# Altium schematic symbol library DS04-254-2-03BK-SMT.SchLib: 1 symbol
Pins are listed as number, name and electrical type; pins without a type are passive.

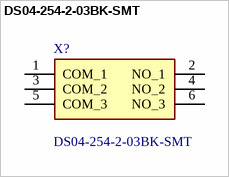
[diagram p0: symbol DS04-254-2-03BK-SMT]

## DS04-254-2-03BK-SMT
designator X?
3 Position, Surface Mount, 2.54 mm Pitch, Flat Slide Actuator, Flat Bottom, SMT Pin, DIP Switch; Manufacturer_Name: Same Sky; Geometry.Height: 4.3mm; Mouser Part Number: 490-DS04254203BK-SMT; Mouser Price/Stock: https://www.mouser.co.uk/ProductDetail/Same-Sky/DS04-254-2-03BK-SMT?qs=wnTfsH77Xs6HyisDGRVjIg%3D%3D; Manufacturer_Part_Number: DS04-254-2-03BK-SMT; Datasheet Link: https://www.sameskydevices.com/product/resource/ds04-254-smt.pdf
footprint DS04254203BKSMT
pins: 1 COM_1, 2 NO_1, 3 COM_2, 4 NO_2, 5 COM_3, 6 NO_3